# Altium footprint library 2020-12-03_22-23-45.PcbLib: 3 footprints
Each footprint in its own frame and in the unit in brackets; x right, y up, seen from the top. Pads: shape width x height; smd on the part's side, far side on the other; paste and mask are expansions set on the pad; w line width, h text height; cw(c..) or ccw(c..) is an arc to the next point about the centre after c.
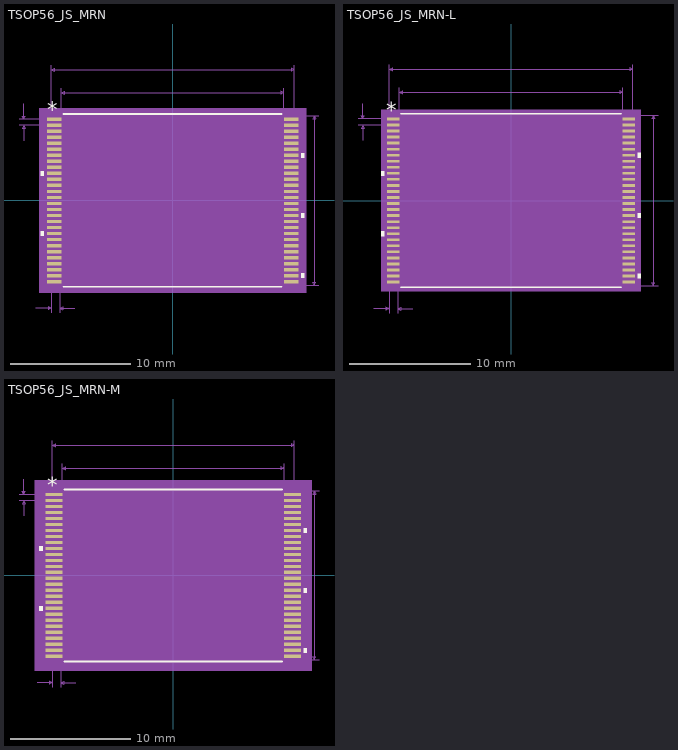
[diagram p0: the footprints below, top view; thin cyan lines are the x and y axes]

## TSOP56_JS_MRN [mil]
pads (56):
  rect 47.5x11 smd paste+0 mask+0: 1(-387.75,265.75) 2(-387.75,246.06) 3(-387.75,226.38) 4(-387.75,206.69) 5(-387.75,187.01) 6(-387.75,167.32) 7(-387.75,147.64) 8(-387.75,127.95) 9(-387.75,108.27) 10(-387.75,88.58) 11(-387.75,68.9) 12(-387.75,49.21) 13(-387.75,29.53) 14(-387.75,9.84) 15(-387.75,-9.84) 16(-387.75,-29.53) 17(-387.75,-49.21) 18(-387.75,-68.9) 19(-387.75,-88.58) 20(-387.75,-108.27) 21(-387.75,-127.95) 22(-387.75,-147.64) 23(-387.75,-167.32) 24(-387.75,-187.01) 25(-387.75,-206.69) 26(-387.75,-226.38) 27(-387.75,-246.06) 28(-387.75,-265.75) 29(387.75,-265.75) 30(387.75,-246.06) 31(387.75,-226.38) 32(387.75,-206.69) 33(387.75,-187.01) 34(387.75,-167.32) 35(387.75,-147.64) 36(387.75,-127.95) 37(387.75,-108.27) 38(387.75,-88.58) 39(387.75,-68.9) 40(387.75,-49.21) 41(387.75,-29.53) 42(387.75,-9.84) 43(387.75,9.84) 44(387.75,29.53) 45(387.75,49.21) 46(387.75,68.9) 47(387.75,88.58) 48(387.75,108.27) 49(387.75,127.95) 50(387.75,147.64) 51(387.75,167.32) 52(387.75,187.01) 53(387.75,206.69) 54(387.75,226.38) 55(387.75,246.06) 56(387.75,265.75)
Top Overlay:
  region: -421.5,96.08 -431.5,96.08 -431.5,81.08 -421.5,81.08
  region: -421.5,-100.77 -431.5,-100.77 -431.5,-115.77 -421.5,-115.77
  region: 421.5,-238.56 431.5,-238.56 431.5,-253.56 421.5,-253.56
  region: 421.5,-41.71 431.5,-41.71 431.5,-56.71 421.5,-56.71
  region: 421.5,155.14 431.5,155.14 431.5,140.14 421.5,140.14
  lines w6: -357.29,-282.5 357.29,-282.5 ; -357.29,282.5 357.29,282.5
  text "*" at -410.25,271.75 h50
Mechanical 5:
  region: 436.5,-302.5 -436.5,-302.5 -436.5,302.5 436.5,302.5
Mechanical 7:
  lines w1: -502.75,246.06 -387.75,246.06 ; -502.75,265.75 -387.75,265.75 ; -487.75,196.06 -487.75,246.06 ; -487.75,315.75 -487.75,265.75 ; -447.5,-352.5 -397.5,-352.5 ; -397.5,-367.5 -397.5,0 -397.5,442.5 ; -369.5,-367.5 -369.5,0 ; -364,0 -364,367.5 ; -319.5,-352.5 -369.5,-352.5 ; 0,-277.5 479,-277.5 ; 0,277.5 479,277.5 ; 364,0 364,367.5 ; 397.5,0 397.5,442.5 ; -487.75,246.06 -492.75,236.06 -482.75,236.06 -487.75,246.06 ; -487.75,265.75 -492.75,275.75 -482.75,275.75 -487.75,265.75 ; -397.5,-352.5 -407.5,-347.5 -407.5,-357.5 -397.5,-352.5 ; -397.5,427.5 397.5,427.5 ; -397.5,427.5 -387.5,432.5 -387.5,422.5 -397.5,427.5 ; -369.5,-352.5 -359.5,-347.5 -359.5,-357.5 -369.5,-352.5 ; -364,352.5 364,352.5 ; -364,352.5 -354,357.5 -354,347.5 -364,352.5 ; 364,352.5 354,357.5 354,347.5 364,352.5 ; 397.5,427.5 387.5,432.5 387.5,422.5 397.5,427.5 ; 464,-277.5 464,277.5 ; 464,-277.5 459,-267.5 469,-267.5 464,-277.5 ; 464,277.5 459,267.5 469,267.5 464,277.5
  text "Default Padstyle: RX47p5Y11D0T" at -375,-477.5 h50
  text "Pin One Padstyle: RX47p5Y11D0T" at -375,-537.5 h50
  text "Alt 1 Padstyle: OX60Y90D30P" at -337.5,-717.5 h50
  text "Alt 2 Padstyle: OX90Y60D30P" at -337.5,-777.5 h50
  text "0.728in/18.491mm" at -100,372.5 h25
  text "0.795in/20.193mm" at -100,447.5 h25
  text "0.555in/14.097mm" at 484,-12.5 h25
  text "0.02in/0.5mm" at -657.75,243.41 h25
  text "0.028in/0.711mm" at -477.25,-397.5 h25
Mechanical 13:
  drawing of 229 lines, arcs and shapes, not listed
  text "*" at -361.5,224.5 h50
Mechanical 15:
  region: -374,-281.25 -421.5,-281.25 -421.5,281.25 -374,281.25 -374,287.5 374,287.5 374,281.25 421.5,281.25 421.5,-281.25 374,-281.25 374,-287.5 -374,-287.5
  lines w6: -421.5,-281.25 -421.5,281.25 -374,281.25 -374,287.5 374,287.5 374,281.25 421.5,281.25 421.5,-281.25 374,-281.25 374,-287.5 -374,-287.5 -374,-281.25 -421.5,-281.25
3D body: height 10, standoff 0, extent 0,0 10,10

## TSOP56_JS_MRN-L [mil]
pads (56):
  rect 39.5x9 smd paste+0 mask+0: 1(-383.75,265.75) 2(-383.75,246.06) 3(-383.75,226.38) 4(-383.75,206.69) 5(-383.75,187.01) 6(-383.75,167.32) 7(-383.75,147.64) 8(-383.75,127.95) 9(-383.75,108.27) 10(-383.75,88.58) 11(-383.75,68.9) 12(-383.75,49.21) 13(-383.75,29.53) 14(-383.75,9.84) 15(-383.75,-9.84) 16(-383.75,-29.53) 17(-383.75,-49.21) 18(-383.75,-68.9) 19(-383.75,-88.58) 20(-383.75,-108.27) 21(-383.75,-127.95) 22(-383.75,-147.64) 23(-383.75,-167.32) 24(-383.75,-187.01) 25(-383.75,-206.69) 26(-383.75,-226.38) 27(-383.75,-246.06) 28(-383.75,-265.75) 29(383.75,-265.75) 30(383.75,-246.06) 31(383.75,-226.38) 32(383.75,-206.69) 33(383.75,-187.01) 34(383.75,-167.32) 35(383.75,-147.64) 36(383.75,-127.95) 37(383.75,-108.27) 38(383.75,-88.58) 39(383.75,-68.9) 40(383.75,-49.21) 41(383.75,-29.53) 42(383.75,-9.84) 43(383.75,9.84) 44(383.75,29.53) 45(383.75,49.21) 46(383.75,68.9) 47(383.75,88.58) 48(383.75,108.27) 49(383.75,127.95) 50(383.75,147.64) 51(383.75,167.32) 52(383.75,187.01) 53(383.75,206.69) 54(383.75,226.38) 55(383.75,246.06) 56(383.75,265.75)
Top Overlay:
  region: -413.5,96.08 -423.5,96.08 -423.5,81.08 -413.5,81.08
  region: -413.5,-100.77 -423.5,-100.77 -423.5,-115.77 -413.5,-115.77
  region: 413.5,-238.56 423.5,-238.56 423.5,-253.56 413.5,-253.56
  region: 413.5,-41.71 423.5,-41.71 423.5,-56.71 413.5,-56.71
  region: 413.5,155.14 423.5,155.14 423.5,140.14 413.5,140.14
  lines w6: -359.36,-282.5 359.36,-282.5 ; -359.36,282.5 359.36,282.5
  text "*" at -406.25,269.75 h50
Mechanical 5:
  region: 422.5,-296.5 -422.5,-296.5 -422.5,296.5 422.5,296.5
Mechanical 7:
  lines w1: -498.75,246.06 -383.75,246.06 ; -498.75,265.75 -383.75,265.75 ; -483.75,196.06 -483.75,246.06 ; -483.75,315.75 -483.75,265.75 ; -447.5,-352.5 -397.5,-352.5 ; -397.5,-367.5 -397.5,0 -397.5,442.5 ; -369.5,-367.5 -369.5,0 ; -364,0 -364,367.5 ; -319.5,-352.5 -369.5,-352.5 ; 0,-277.5 479,-277.5 ; 0,277.5 479,277.5 ; 364,0 364,367.5 ; 397.5,0 397.5,442.5 ; -483.75,246.06 -488.75,236.06 -478.75,236.06 -483.75,246.06 ; -483.75,265.75 -488.75,275.75 -478.75,275.75 -483.75,265.75 ; -397.5,-352.5 -407.5,-347.5 -407.5,-357.5 -397.5,-352.5 ; -397.5,427.5 397.5,427.5 ; -397.5,427.5 -387.5,432.5 -387.5,422.5 -397.5,427.5 ; -369.5,-352.5 -359.5,-347.5 -359.5,-357.5 -369.5,-352.5 ; -364,352.5 364,352.5 ; -364,352.5 -354,357.5 -354,347.5 -364,352.5 ; 364,352.5 354,357.5 354,347.5 364,352.5 ; 397.5,427.5 387.5,432.5 387.5,422.5 397.5,427.5 ; 464,-277.5 464,277.5 ; 464,-277.5 459,-267.5 469,-267.5 464,-277.5 ; 464,277.5 459,267.5 469,267.5 464,277.5
  text "Default Padstyle: RX39p5Y9D0T" at -362.5,-477.5 h50
  text "Pin One Padstyle: RX39p5Y9D0T" at -362.5,-537.5 h50
  text "Alt 1 Padstyle: OX60Y90D30P" at -337.5,-717.5 h50
  text "Alt 2 Padstyle: OX90Y60D30P" at -337.5,-777.5 h50
  text "0.728in/18.491mm" at -100,372.5 h25
  text "0.795in/20.193mm" at -100,447.5 h25
  text "0.555in/14.097mm" at 484,-12.5 h25
  text "0.02in/0.5mm" at -653.75,243.41 h25
  text "0.028in/0.711mm" at -477.25,-397.5 h25
Mechanical 13:
  drawing of 229 lines, arcs and shapes, not listed
  text "*" at -361.5,224.5 h50
Mechanical 15:
  region: -368,-274.25 -407.5,-274.25 -407.5,274.25 -368,274.25 -368,281.5 368,281.5 368,274.25 407.5,274.25 407.5,-274.25 368,-274.25 368,-281.5 -368,-281.5
  lines w6: -407.5,-274.25 -407.5,274.25 -368,274.25 -368,281.5 368,281.5 368,274.25 407.5,274.25 407.5,-274.25 368,-274.25 368,-281.5 -368,-281.5 -368,-274.25 -407.5,-274.25
3D body: height 10, standoff 0, extent 0,0 10,10

## TSOP56_JS_MRN-M [mil]
pads (56):
  rect 55.5x11 smd paste+0 mask+0: 1(-391.75,265.75) 2(-391.75,246.06) 3(-391.75,226.38) 4(-391.75,206.69) 5(-391.75,187.01) 6(-391.75,167.32) 7(-391.75,147.64) 8(-391.75,127.95) 9(-391.75,108.27) 10(-391.75,88.58) 11(-391.75,68.9) 12(-391.75,49.21) 13(-391.75,29.53) 14(-391.75,9.84) 15(-391.75,-9.84) 16(-391.75,-29.53) 17(-391.75,-49.21) 18(-391.75,-68.9) 19(-391.75,-88.58) 20(-391.75,-108.27) 21(-391.75,-127.95) 22(-391.75,-147.64) 23(-391.75,-167.32) 24(-391.75,-187.01) 25(-391.75,-206.69) 26(-391.75,-226.38) 27(-391.75,-246.06) 28(-391.75,-265.75) 29(391.75,-265.75) 30(391.75,-246.06) 31(391.75,-226.38) 32(391.75,-206.69) 33(391.75,-187.01) 34(391.75,-167.32) 35(391.75,-147.64) 36(391.75,-127.95) 37(391.75,-108.27) 38(391.75,-88.58) 39(391.75,-68.9) 40(391.75,-49.21) 41(391.75,-29.53) 42(391.75,-9.84) 43(391.75,9.84) 44(391.75,29.53) 45(391.75,49.21) 46(391.75,68.9) 47(391.75,88.58) 48(391.75,108.27) 49(391.75,127.95) 50(391.75,147.64) 51(391.75,167.32) 52(391.75,187.01) 53(391.75,206.69) 54(391.75,226.38) 55(391.75,246.06) 56(391.75,265.75)
Top Overlay:
  region: -429.5,96.08 -439.5,96.08 -439.5,81.08 -429.5,81.08
  region: -429.5,-100.77 -439.5,-100.77 -439.5,-115.77 -429.5,-115.77
  region: 429.5,-238.56 439.5,-238.56 439.5,-253.56 429.5,-253.56
  region: 429.5,-41.71 439.5,-41.71 439.5,-56.71 429.5,-56.71
  region: 429.5,155.14 439.5,155.14 439.5,140.14 429.5,140.14
  lines w6: -357.29,-282.5 357.29,-282.5 ; -357.29,282.5 357.29,282.5
  text "*" at -414.25,271.75 h50
Mechanical 5:
  region: 454.5,-312.5 -454.5,-312.5 -454.5,312.5 454.5,312.5
Mechanical 7:
  lines w1: -506.75,246.06 -391.75,246.06 ; -506.75,265.75 -391.75,265.75 ; -491.75,196.06 -491.75,246.06 ; -491.75,315.75 -491.75,265.75 ; -447.5,-352.5 -397.5,-352.5 ; -397.5,-367.5 -397.5,0 -397.5,442.5 ; -369.5,-367.5 -369.5,0 ; -364,0 -364,367.5 ; -319.5,-352.5 -369.5,-352.5 ; 0,-277.5 479,-277.5 ; 0,277.5 479,277.5 ; 364,0 364,367.5 ; 397.5,0 397.5,442.5 ; -491.75,246.06 -496.75,236.06 -486.75,236.06 -491.75,246.06 ; -491.75,265.75 -496.75,275.75 -486.75,275.75 -491.75,265.75 ; -397.5,-352.5 -407.5,-347.5 -407.5,-357.5 -397.5,-352.5 ; -397.5,427.5 397.5,427.5 ; -397.5,427.5 -387.5,432.5 -387.5,422.5 -397.5,427.5 ; -369.5,-352.5 -359.5,-347.5 -359.5,-357.5 -369.5,-352.5 ; -364,352.5 364,352.5 ; -364,352.5 -354,357.5 -354,347.5 -364,352.5 ; 364,352.5 354,357.5 354,347.5 364,352.5 ; 397.5,427.5 387.5,432.5 387.5,422.5 397.5,427.5 ; 464,-277.5 464,277.5 ; 464,-277.5 459,-267.5 469,-267.5 464,-277.5 ; 464,277.5 459,267.5 469,267.5 464,277.5
  text "Default Padstyle: RX55p5Y11D0T" at -375,-477.5 h50
  text "Pin One Padstyle: RX55p5Y11D0T" at -375,-537.5 h50
  text "Alt 1 Padstyle: OX60Y90D30P" at -337.5,-717.5 h50
  text "Alt 2 Padstyle: OX90Y60D30P" at -337.5,-777.5 h50
  text "0.728in/18.491mm" at -100,372.5 h25
  text "0.795in/20.193mm" at -100,447.5 h25
  text "0.555in/14.097mm" at 484,-12.5 h25
  text "0.02in/0.5mm" at -661.75,243.41 h25
  text "0.028in/0.711mm" at -477.25,-397.5 h25
Mechanical 13:
  drawing of 229 lines, arcs and shapes, not listed
  text "*" at -361.5,224.5 h50
Mechanical 15:
  region: -384,-291.25 -439.5,-291.25 -439.5,291.25 -384,291.25 -384,297.5 384,297.5 384,291.25 439.5,291.25 439.5,-291.25 384,-291.25 384,-297.5 -384,-297.5
  lines w6: -439.5,-291.25 -439.5,291.25 -384,291.25 -384,297.5 384,297.5 384,291.25 439.5,291.25 439.5,-291.25 384,-291.25 384,-297.5 -384,-297.5 -384,-291.25 -439.5,-291.25
3D body: height 10, standoff 0, extent 0,0 10,10